# Altium footprint library U_FL.PcbLib: 1 footprints
Each footprint in its own frame and in the unit in brackets; x right, y up, seen from the top. Pads: shape width x height; smd on the part's side, far side on the other; paste and mask are expansions set on the pad; w line width, h text height; cw(c..) or ccw(c..) is an arc to the next point about the centre after c.
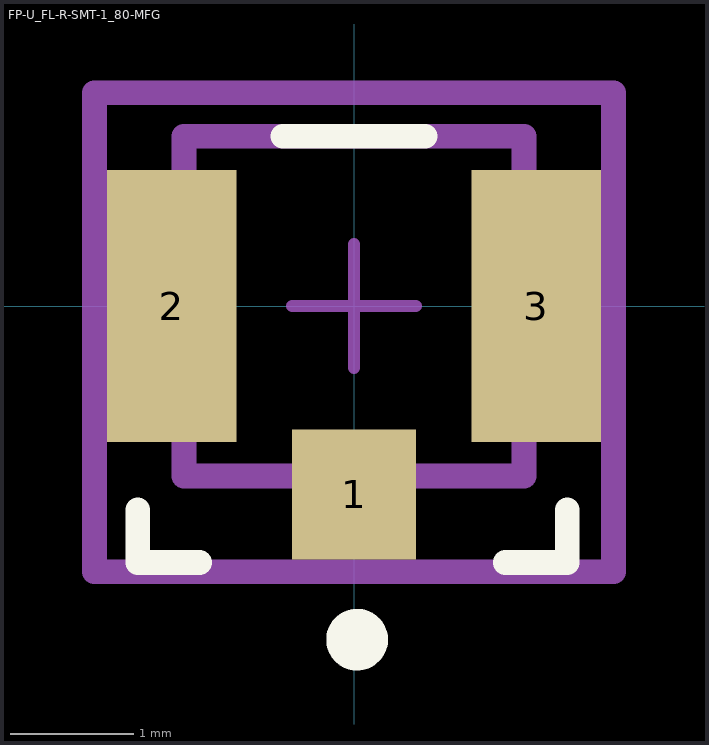
[diagram p0: the footprint, top view; thin cyan lines are the x and y axes]

## FP-U_FL-R-SMT-1_80-MFG [mm]
pads (3):
  rect 1x1.05 smd paste-1000 mask+0: 1(0,-1.525)
  rect 1.05x2.2 smd paste-1000 mask+0: 2(-1.475,0) 3(1.475,0)
Top Overlay:
  circle w0.25: c0.025,-2.7 r0.125
  lines w0.2: -1.75,-1.65 -1.75,-2.075 -1.25,-2.075 ; -0.575,1.375 0.575,1.375 ; 1.225,-2.075 1.725,-2.075 1.725,-1.65
Top Paste:
  rectangle: -0.4,-1.95 0.4,-1.1
  rectangle: 1.05,-1 1.95,1
  rectangle: -1.95,-1 -1.05,1
Top Assembly:
  lines w0.2: -2.1,-2.15 -2.1,1.725 2.1,1.725 2.1,-2.15 -2.1,-2.15
  text ".Designator" at 0,-0.025 h1
Top 3D Body:
  lines w0.2: -1.375,-1.375 -1.375,1.375 1.375,1.375 1.375,-1.375 -1.375,-1.375
Top Courtyard:
  lines w0.2: -2.1,-2.15 -2.1,1.725 2.1,1.725 2.1,-2.15 -2.1,-2.15
Top Component Center:
  lines w0.1: -0.5,0 0.5,0 ; 0,-0.5 0,0.5
3D body "Conn_Hirose_Electric_Co_Ltd_U_FL-R-SMT-1_80_eec.STEP": height 0.25, standoff 0, extent -2.1,-2.15 2.1,1.725